# Altium footprint library UDN2981A-T.PcbLib: 1 footprints
Each footprint in its own frame and in the unit in brackets; x right, y up, seen from the top. Pads: shape width x height; smd on the part's side, far side on the other; paste and mask are expansions set on the pad; w line width, h text height; cw(c..) or ccw(c..) is an arc to the next point about the centre after c.
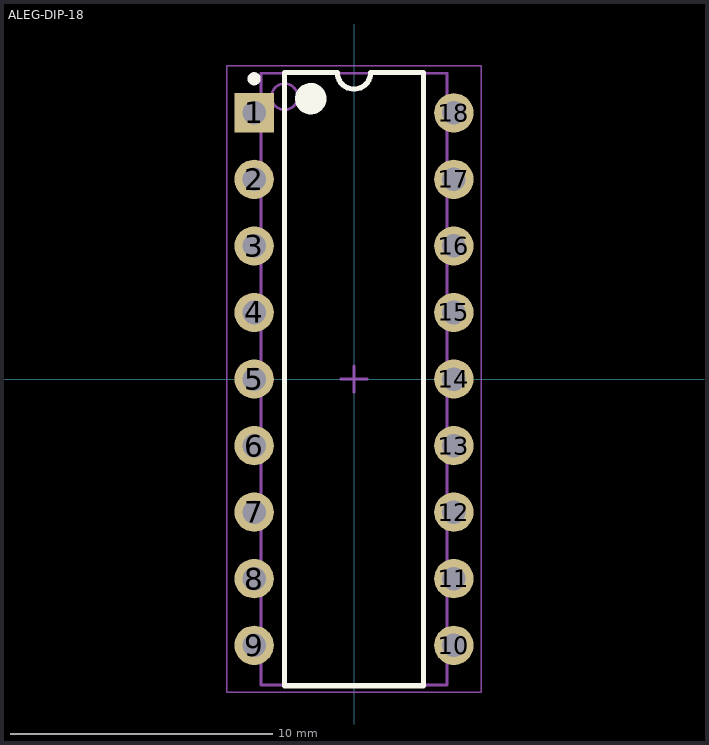
[diagram p0: the footprint, top view; thin cyan lines are the x and y axes]

## ALEG-DIP-18 [mm] "DIP, 8-Leads, Body 23.35x7.1mm, Pitch 2.54mm"
height 5.33
pads (18):
  rect 1.5x1.5 hole 0.9: 1(-3.81,10.16)
  round 1.5 hole 0.9: 2(-3.81,7.62) 3(-3.81,5.08) 4(-3.81,2.54) 5(-3.81,0) 6(-3.81,-2.54) 7(-3.81,-5.08) 8(-3.81,-7.62) 9(-3.81,-10.16) 10(3.81,-10.16) 11(3.81,-7.62) 12(3.81,-5.08) 13(3.81,-2.54) 14(3.81,0) 15(3.81,2.54) 16(3.81,5.08) 17(3.81,7.62) 18(3.81,10.16)
Top Overlay:
  circle w0.25: c-3.81,11.46 r0.125
  circle w0.6: c-1.65,10.7 r0.3
  lines w0.2: -2.65,-11.7 -2.65,11.7 -0.635,11.7 ccw(c0,11.7) 0.635,11.7 2.65,11.7 2.65,-11.7 -2.65,-11.7
Mechanical 13:
  circle w0.1: c-2.65,10.775 r0.5
  lines w0.1: -3.55,-11.675 -3.55,11.675 3.55,11.675 3.55,-11.675 -3.55,-11.675
Mechanical 15:
  lines w0.05: -4.85,-11.95 -4.85,11.95 4.85,11.95 4.85,-11.95 -4.85,-11.95
  lines w0.1: -0.5,0 0.5,0 ; 0,-0.5 0,0.5
3D body: height 2.73, standoff 0, extent -3.945,9.66 -3.675,10.66
3D body: height 3, standoff 2.73, extent -3.945,9.66 -3.55,10.66
3D body: height 0, standoff -1.6, extent -3.945,9.8 -3.675,10.52
3D body: height 2.73, standoff 0, extent -3.945,7.12 -3.675,8.12
3D body: height 3, standoff 2.73, extent -3.945,7.12 -3.55,8.12
3D body: height 0, standoff -1.6, extent -3.945,7.26 -3.675,7.98
3D body: height 2.73, standoff 0, extent -3.945,4.58 -3.675,5.58
3D body: height 3, standoff 2.73, extent -3.945,4.58 -3.55,5.58
3D body: height 0, standoff -1.6, extent -3.945,4.72 -3.675,5.44
3D body: height 2.73, standoff 0, extent -3.945,2.04 -3.675,3.04
3D body: height 3, standoff 2.73, extent -3.945,2.04 -3.55,3.04
3D body: height 0, standoff -1.6, extent -3.945,2.18 -3.675,2.9
3D body: height 2.73, standoff 0, extent -3.945,-0.5 -3.675,0.5
3D body: height 3, standoff 2.73, extent -3.945,-0.5 -3.55,0.5
3D body: height 0, standoff -1.6, extent -3.945,-0.36 -3.675,0.36
3D body: height 2.73, standoff 0, extent -3.945,-3.04 -3.675,-2.04
3D body: height 3, standoff 2.73, extent -3.945,-3.04 -3.55,-2.04
3D body: height 0, standoff -1.6, extent -3.945,-2.9 -3.675,-2.18
3D body: height 2.73, standoff 0, extent -3.945,-5.58 -3.675,-4.58
3D body: height 3, standoff 2.73, extent -3.945,-5.58 -3.55,-4.58
3D body: height 0, standoff -1.6, extent -3.945,-5.44 -3.675,-4.72
3D body: height 2.73, standoff 0, extent -3.945,-8.12 -3.675,-7.12
3D body: height 3, standoff 2.73, extent -3.945,-8.12 -3.55,-7.12
3D body: height 0, standoff -1.6, extent -3.945,-7.98 -3.675,-7.26
3D body: height 2.73, standoff 0, extent -3.945,-10.66 -3.675,-9.66
3D body: height 3, standoff 2.73, extent -3.945,-10.66 -3.55,-9.66
3D body: height 0, standoff -1.6, extent -3.945,-10.52 -3.675,-9.8
3D body: height 2.73, standoff 0, extent 3.675,-10.66 3.945,-9.66
3D body: height 3, standoff 2.73, extent 3.55,-10.66 3.945,-9.66
3D body: height 0, standoff -1.6, extent 3.675,-10.52 3.945,-9.8
3D body: height 2.73, standoff 0, extent 3.675,-8.12 3.945,-7.12
3D body: height 3, standoff 2.73, extent 3.55,-8.12 3.945,-7.12
3D body: height 0, standoff -1.6, extent 3.675,-7.98 3.945,-7.26
3D body: height 2.73, standoff 0, extent 3.675,-5.58 3.945,-4.58
3D body: height 3, standoff 2.73, extent 3.55,-5.58 3.945,-4.58
3D body: height 0, standoff -1.6, extent 3.675,-5.44 3.945,-4.72
3D body: height 2.73, standoff 0, extent 3.675,-3.04 3.945,-2.04
3D body: height 3, standoff 2.73, extent 3.55,-3.04 3.945,-2.04
3D body: height 0, standoff -1.6, extent 3.675,-2.9 3.945,-2.18
3D body: height 2.73, standoff 0, extent 3.675,-0.5 3.945,0.5
3D body: height 3, standoff 2.73, extent 3.55,-0.5 3.945,0.5
3D body: height 0, standoff -1.6, extent 3.675,-0.36 3.945,0.36
3D body: height 2.73, standoff 0, extent 3.675,2.04 3.945,3.04
3D body: height 3, standoff 2.73, extent 3.55,2.04 3.945,3.04
3D body: height 0, standoff -1.6, extent 3.675,2.18 3.945,2.9
3D body: height 2.73, standoff 0, extent 3.675,4.58 3.945,5.58
3D body: height 3, standoff 2.73, extent 3.55,4.58 3.945,5.58
3D body: height 0, standoff -1.6, extent 3.675,4.72 3.945,5.44
3D body: height 2.73, standoff 0, extent 3.675,7.12 3.945,8.12
3D body: height 3, standoff 2.73, extent 3.55,7.12 3.945,8.12
3D body: height 0, standoff -1.6, extent 3.675,7.26 3.945,7.98
3D body: height 2.73, standoff 0, extent 3.675,9.66 3.945,10.66
3D body: height 3, standoff 2.73, extent 3.55,9.66 3.945,10.66
3D body: height 0, standoff -1.6, extent 3.675,9.8 3.945,10.52
3D body: height 5.33, standoff 0.39, extent -3.55,-11.675 3.55,11.675